# Altium schematic symbol library TIE_2023_SchLib.SchLib: 33 symbols
Pins are listed as number, name and electrical type; pins without a type are passive.

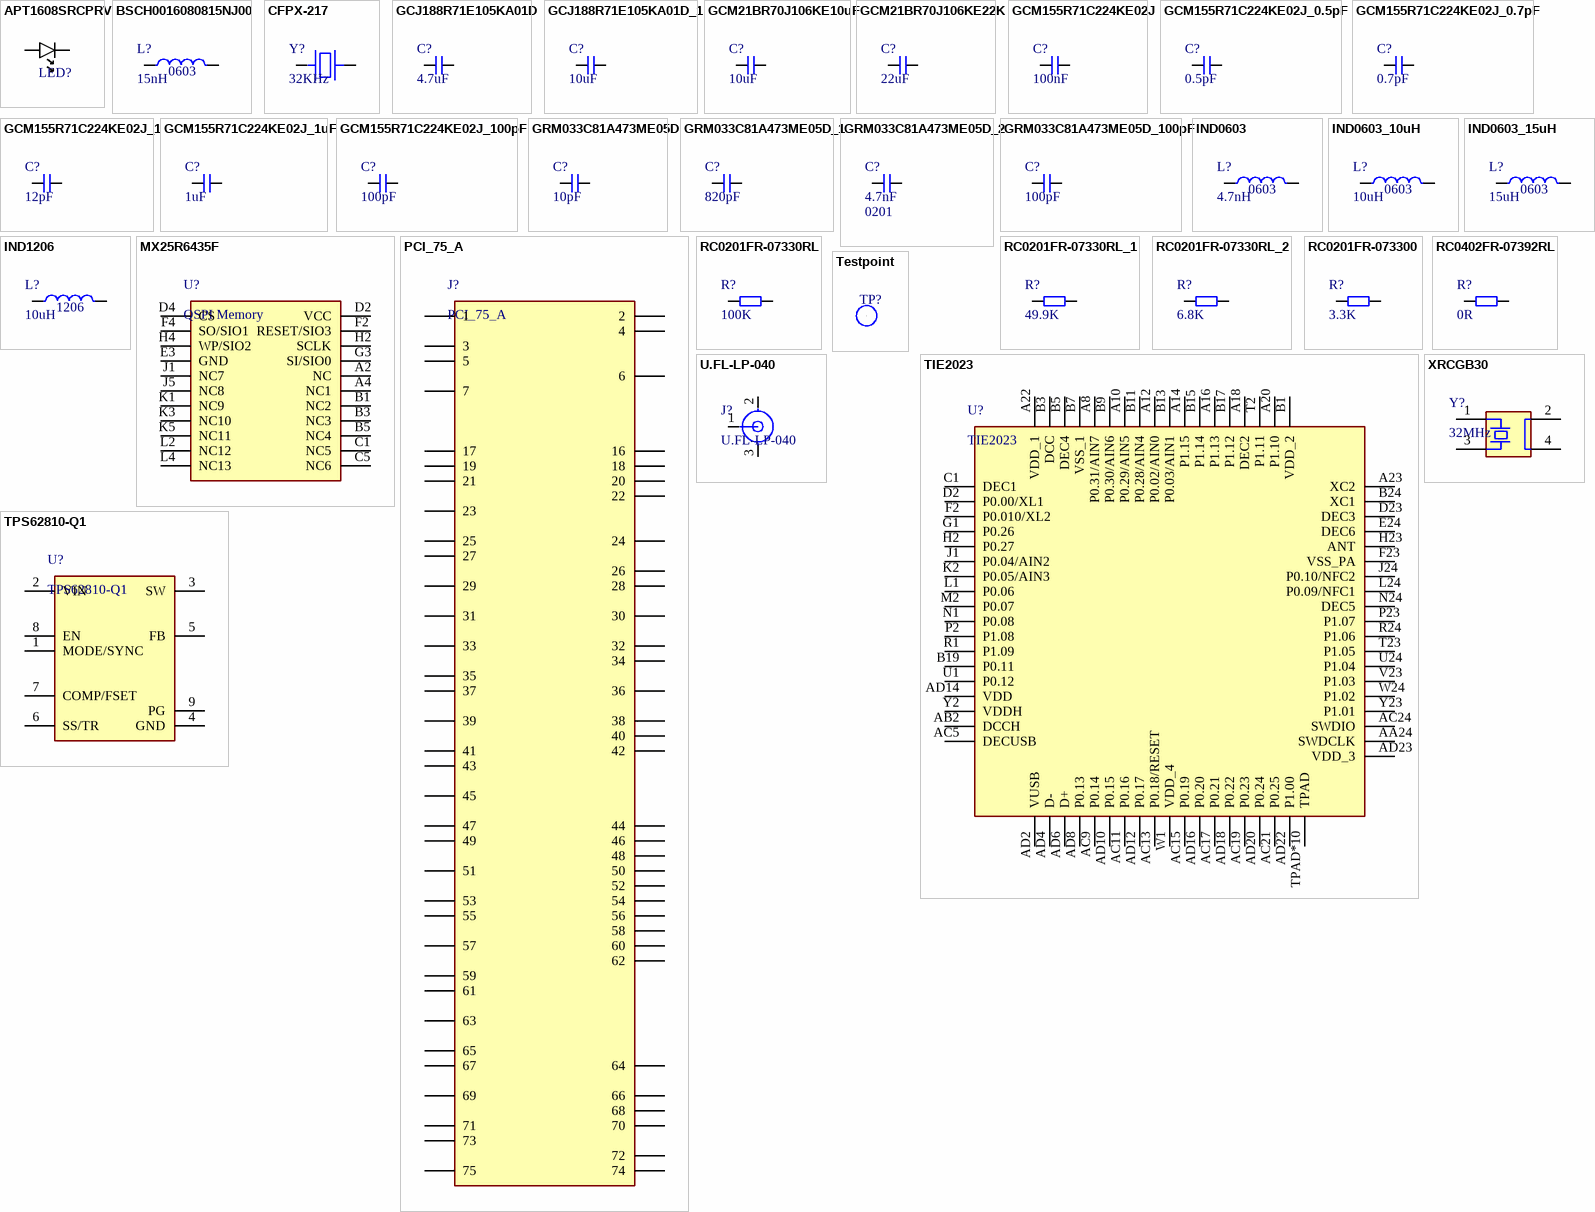
[diagram p0: symbols APT1608SRCPRV to XRCGB30]

## APT1608SRCPRV
designator LED?  (value not drawn)
Standard LEDs - SMD RED WATER CLEAR; Manufacturer: Kingbright; .Checked_PCB: IC; Manufacturer Part Number: APT1608SRCPRV; .Checked_SCH: IC
footprint LED0402
pins: 1, 2

## BSCH0016080815NJ00
designator L?, comment 15nH  Package: 0603
RF Inductors - SMD 15nH RDC=0.32Ohms 600mA
footprint FB_0603
pins: 1, 2

## CFPX-217
designator Y?, comment 32KHz
A 3.2 x 1.5mm SMD crystal in a ceramic package with a seam / sealed metal lid, hermetically sealed
footprint CFPX-3.2X1.5 (32kHz Crystal)
pins: 1, 2

## GCJ188R71E105KA01D
designator C?, comment 4.7uF
CAP CER 4.7uF 25V X7R 0603; Manufacturer: Murata; Manufacturer Part Number: GCJ188R71E105KA01D; .Checked_PCB: IC; .Checked_SCH: IC; .Creator: IC
footprint CAP0603
pins: 1, 2

## GCJ188R71E105KA01D_1
designator C?, comment 10uF
CAP CER 10uF 25V X7R 0603; Manufacturer: Murata; Manufacturer Part Number: GCJ188R71E105KA01D; .Checked_PCB: IC; .Checked_SCH: IC; .Creator: IC
footprint CAP0603
pins: 1, 2

## GCM21BR70J106KE10uF
designator C?, comment 10uF
CAP CER 10uF 10% 6.3V X7R 0805; Manufacturer: Murata; Manufacturer Part Number: GCM21BR70J106KE22K; .Checked_PCB: AI; .Checked_SCH: AI; .Creator: AI
footprint CAP0805
pins: 1, 2

## GCM21BR70J106KE22K
designator C?, comment 22uF
CAP CER 22uF 10% 6.3V X7R 0805; Manufacturer: Murata; Manufacturer Part Number: GCM21BR70J106KE22K; .Checked_PCB: AI; .Checked_SCH: AI; .Creator: AI
footprint CAP0805
pins: 1, 2

## GCM155R71C224KE02J
designator C?, comment 100nF
CAP CER 100nF 16V X7R 0402; Manufacturer: Murata; Manufacturer Part Number: GCM155R71C224KE02J
footprint CAP0402
pins: 1, 2

## GCM155R71C224KE02J_0.5pF
designator C?, comment 0.5pF
CAP CER 0.5pF 16V X7R 0402; Manufacturer: Murata; Manufacturer Part Number: GCM155R71C224KE02J
footprint CAP0402
pins: 1, 2

## GCM155R71C224KE02J_0.7pF
designator C?, comment 0.7pF
CAP CER 0.7pF 16V X7R 0402; Manufacturer: Murata; Manufacturer Part Number: GCM155R71C224KE02J
footprint CAP0402
pins: 1, 2

## GCM155R71C224KE02J_1
designator C?, comment 12pF
CAP CER 12pF 16V X7R 0402; Manufacturer: Murata; Manufacturer Part Number: GCM155R71C224KE02J
footprint CAP0402
pins: 1, 2

## GCM155R71C224KE02J_1uF
designator C?, comment 1uF
CAP CER 1uF 16V X7R 0402; Manufacturer: Murata; Manufacturer Part Number: GCM155R71C224KE02J
footprint CAP0402
pins: 1, 2

## GCM155R71C224KE02J_100pF
designator C?, comment 100pF
CAP CER 100pF 16V X7R 0402; Manufacturer: Murata; Manufacturer Part Number: GCM155R71C224KE02J
footprint CAP0402
pins: 1, 2

## GRM033C81A473ME05D
designator C?, comment 10pF
CAP CER 10pF 20% 10V X6S 0201; Manufacturer: Murata; Manufacturer Part Number: GRM033C81A473ME05D; .Checked_PCB: AI; .Checked_SCH: AI; .Creator: AI
footprint CAP0201
pins: 1, 2

## GRM033C81A473ME05D_1
designator C?, comment 820pF
CAP CER 820pF 20% 10V X6S 0201; Manufacturer: Murata; Manufacturer Part Number: GRM033C81A473ME05D; .Checked_PCB: AI; .Checked_SCH: AI; .Creator: AI
footprint CAP0201
pins: 1, 2

## GRM033C81A473ME05D_2
designator C?, comment 4.7nF  Package: 0201
CAP CER 4.7nF 20% 10V X6S 0201; Manufacturer: Murata; Manufacturer Part Number: GRM033C81A473ME05D; .Checked_PCB: AI; .Checked_SCH: AI; .Creator: AI
footprint CAP0201
pins: 1, 2

## GRM033C81A473ME05D_100pF
designator C?, comment 100pF
CAP CER 100pF 20% 10V X6S 0201; Manufacturer: Murata; Manufacturer Part Number: GRM033C81A473ME05D; .Checked_PCB: AI; .Checked_SCH: AI; .Creator: AI
footprint CAP0201
pins: 1, 2

## IND0603
designator L?, comment 4.7nH  Package: 0603
Power Inductors - SMD 3655 0603 4N7 +/- 0.3nH T&R
footprint FB_0603
pins: 1, 2

## IND0603_10uH
designator L?, comment 10uH  Package: 0603
Power Inductors - SMD 3655 0603 4N7 +/- 0.3nH T&R
footprint FB_0603
pins: 1, 2

## IND0603_15uH
designator L?, comment 15uH  Package: 0603
Power Inductors - SMD 3655 0603 4N7 +/- 0.3nH T&R
footprint FB_0603
pins: 1, 2

## IND1206
designator L?, comment 10uH  Package: 1206
Power Inductors - SMD 0603 10uH 20%
footprint FB_1206
pins: 1, 2

## MX25R6435F
designator U?, comment QSPI Memory
NOR Flash Serial NOR 1.65V-3.6V 64Mbit x4 I/O WLCSP-22
footprint WLCSP-22
pins: A2 NC, A4 NC1, B1 NC2, B3 NC3, B5 NC4, C1 NC5, C5 NC6, D2 VCC, D4 CS, E3 GND, F2 RESET/SIO3, F4 SO/SIO1, G3 SI/SIO0, H2 SCLK, H4 WP/SIO2, J1 NC7, J5 NC8, K1 NC9, K3 NC10, K5 NC11, L2 NC12, L4 NC13

## PCI_75_A
designator J?  (no BOM)
M2 Key A Edge Connector
footprint PCI_75_a
pins: 1, 2, 3, 4, 5, 6, 7, 16, 17, 18, 19, 20, 21, 22, 23, 24, 25, 26, 27, 28, 29, 30, 31, 32, 33, 34, 35, 36, 37, 38, 39, 40, 41, 42, 43, 44, 45, 46, 47, 48, 49, 50, 51, 52, 53, 54, 55, 56, 57, 58, 59, 60, 61, 62, 63, 64, 65, 66, 67, 68, 69, 70, 71, 72, 73, 74, 75

## RC0201FR-07330RL
designator R?, comment 100K
RES SMD 100K OHM 1% 1/20W 0201; Manufacturer: Yageo; Manufacturer Part Number: RC0201FR-07330RL; .Checked_PCB: AI; .Checked_SCH: AI; .Creator: AI
footprint RES0201
pins: 1, 2

## RC0201FR-07330RL_1
designator R?, comment 49.9K
RES SMD 49.9K OHM 1% 1/20W 0201; Manufacturer: Yageo; Manufacturer Part Number: RC0201FR-07330RL; .Checked_PCB: AI; .Checked_SCH: AI; .Creator: AI
footprint RES0201
pins: 1, 2

## RC0201FR-07330RL_2
designator R?, comment 6.8K
RES SMD 6.8K OHM 1% 1/20W 0201; Manufacturer: Yageo; Manufacturer Part Number: RC0201FR-07330RL; .Checked_PCB: AI; .Checked_SCH: AI; .Creator: AI
footprint RES0201
pins: 1, 2

## RC0201FR-073300
designator R?, comment 3.3K
RES SMD 3.3KK OHM 1% 1/20W 0201; Manufacturer: Yageo; Manufacturer Part Number: RC0201FR-07330RL; .Checked_PCB: AI; .Checked_SCH: AI; .Creator: AI
footprint RES0201
pins: 1, 2

## RC0402FR-07392RL
designator R?, comment 0R
RES SMD 0 OHM 1% 1/16W 0402; Manufacturer: Yageo; Manufacturer Part Number: RC0402FR-07392RL
footprint RES0402
footprint RES0201
pins: 1, 2

## Testpoint
designator TP?  (value not drawn)  (no BOM)
• SMD Pad diameter of 1mm. / • Solder mask opening = 0.075mm from pad edge;
footprint TestPoint
pins: 1

## TIE2023
designator U?
Bluetooth, NFC and ANT+ IC
footprint TIE23_IC
pins: A8 P0.31/AIN7, A10 P0.29/AIN5, A12 P0.02/AIN0, A14 P1.15, A16 P1.13, A18 DEC2, A20 P1.10, A22 VDD_1, A23 XC2, AA24 SWDCLK, AB2 DCCH, AC5 DECUSB, AC9 P0.14, AC11 P0.16, AC13 P0.18/RESET, AC15 P0.19, AC17 P0.21, AC19 P0.23, AC21 P0.25, AC24 SWDIO, AD2 VUSB, AD4 D-, AD6 D+, AD8 P0.13, AD10 P0.15, AD12 P0.17, AD14 VDD, AD16 P0.20, AD18 P0.22, AD20 P0.24, AD22 P1.00, AD23 VDD_3, B1 VDD_2, B3 DCC, B5 DEC4, B7 VSS_1, B9 P0.30/AIN6, B11 P0.28/AIN4, B13 P0.03/AIN1, B15 P1.14, B17 P1.12, B19 P0.11, B24 XC1, C1 DEC1, D2 P0.00/XL1, D23 DEC3, E24 DEC6, F2 P0.010/XL2, F23 VSS_PA, G1 P0.26, H2 P0.27, H23 ANT, J1 P0.04/AIN2, J24 P0.10/NFC2, K2 P0.05/AIN3, L1 P0.06, L24 P0.09/NFC1, M2 P0.07, N1 P0.08, N24 DEC5, P2 P1.08, P23 P1.07, R1 P1.09, R24 P1.06, T2 P1.11, T23 P1.05, TPAD*10 TPAD, U1 P0.12, U24 P1.04, V23 P1.03, W1 VDD_4, W24 P1.02, Y2 VDDH, Y23 P1.01

## TPS62810-Q1
designator U?
Switching Voltage Regulators Automotive 2.75-V to 6-V 4-A step-down
footprint VQFN-9
pins: 1 MODE/SYNC, 2 VIN, 3 SW, 4 GND, 5 FB, 6 SS/TR, 7 COMP/FSET, 8 EN, 9 PG

## U.FL-LP-040
designator J?
Ultra Small Surface Mount Coaxial Connectors
footprint U.FL-R-SMT-1
pins: 1, 2, 3

## XRCGB30
designator Y?, comment 32MHz
A 2 x 1.6mm SMD crystal in a ceramic package
footprint XRCGB-2X1.6 (32MHz Crystal)
pins: 1, 2, 3, 4